# EAGLE library part ES4L15BA1 (library card_samac_3d)
Board Mount Motion & Position Sensors 9-axis IMU Source: Datasheet <https://www.ceva-dsp.com/wp-content/uploads/2019/10/BNO080_085-Datasheet.pdf>
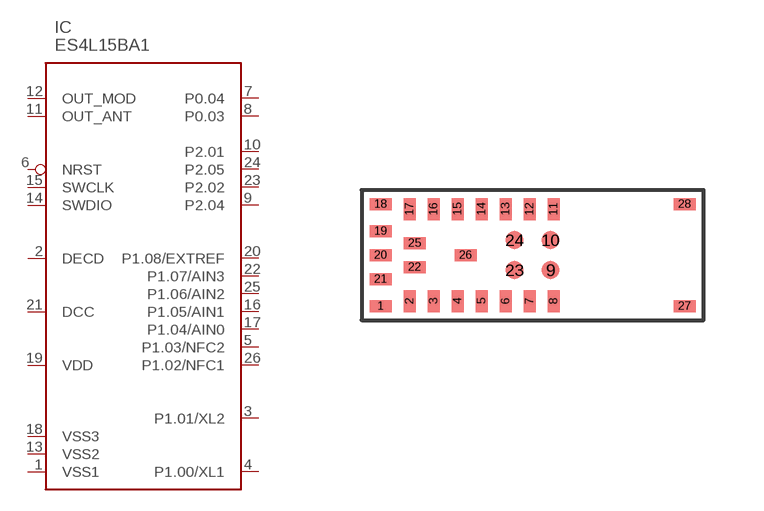
[diagram p0: symbol with the pads of ES4L15BA1; footprint ES4L15BA1]

Designator prefix IC

## ES4L15BA1  [ES4L15BA1]
1  VSS1
2  DECD
3  P1.01/XL2
4  P1.00/XL1
5  P1.03/NFC2
6  NRST
7  P0.04
8  P0.03
9  P2.04
10  P2.01
11  OUT_ANT
12  OUT_MOD
13  VSS2
14  SWDIO
15  SWCLK
16  P1.05/AIN1
17  P1.04/AIN0
18  VSS3
19  VDD
20  P1.08/EXTREF
21  DCC
22  P1.07/AIN3
23  P2.02
24  P2.05
25  P1.06/AIN2
26  P1.02/NFC1

## Footprint ES4L15BA1 (pad centres in mm)
BNO085-3
smd 0.55 x 0.3: 1 -3.8,-1.275; 18 -3.8,1.275; 19 -3.8,0.6; 20 -3.8,0; 21 -3.8,-0.6; 22 -2.95,-0.3; 25 -2.95,0.3; 26 -1.675,0; 27 3.8,-1.275; 28 3.8,1.275
smd 0.3 x 0.55: 2 -3.075,-1.15; 3 -2.475,-1.15; 4 -1.875,-1.15; 5 -1.275,-1.15; 6 -0.675,-1.15; 7 -0.075,-1.15; 8 0.525,-1.15; 11 0.525,1.15; 12 -0.075,1.15; 13 -0.675,1.15; 14 -1.275,1.15; 15 -1.875,1.15; 16 -2.475,1.15; 17 -3.075,1.15
smd 0.45 x 0.45: 9 0.45,-0.375; 10 0.45,0.375; 23 -0.45,-0.375; 24 -0.45,0.375